# Altium schematic symbol library CL31C220JBCNNNC.SchLib: 1 symbol
Pins are listed as number, name and electrical type; pins without a type are passive.

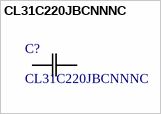
[diagram p0: symbol CL31C220JBCNNNC]

## CL31C220JBCNNNC
designator C?
Description; Manufacturer_Name: Samsung; Copyright: Copyright (C) 2026 Ultra Librarian. All rights reserved.; Manufacturer_Part_Number: CL31C220JBCNNNC
footprint CAP_CL31_SAM
pins: 1, 2